# EAGLE library part 6130XX25721_61300625721 (library WR-PHD)
WR-PHD 2.54 mm Dual Socket Header Bottom Entry ARTICLE PROPERTIES: Pins:4;​ 6;​ 8;​ 10;​ 12;​ 16;​ 20;​ 24;​ 26;​ 32;​ 34 KIND PROPERTIES: Pitch：2.54 mm Quality Class:3 as per CECC 75 301-802 Rows：Dual Gender：Socket Header Type：Bottom Entry MATERIAL PROPERTIES: Insulator Material :PA46 Insulator Flammability Rating:UL94 V-0 Contact Material:Copper Alloy Contact Plating:Gold Contact Type:Stamped GENERAL INFORMATION Operating Temperature:-40 up to +125 °C Compliance:Lead free / RoHS ELECTRICAL PROPERTIES: Rated Current:3 A IR:3A Withstanding Voltage:500 V (AC) Contact Resistance:20 mΩ RISO:1000 MΩ CERTIFICATION UL Approval:E323964 PACKAGING PROPERTIES Packaging:Tube <https://katalog.we-online.com/media/images/v2/o33217v209%20Family_WR-PHD_6130xx25721.jpg> Details see: https://katalog.we-online.com/en/em/PHD_2_54_DUAL_SOCKET_HEADER_BOTTOM_ENTRY_6130XX25721 Updated by Yingchun,Shan 2019-10-22 2019 (C) Würth Elektronik
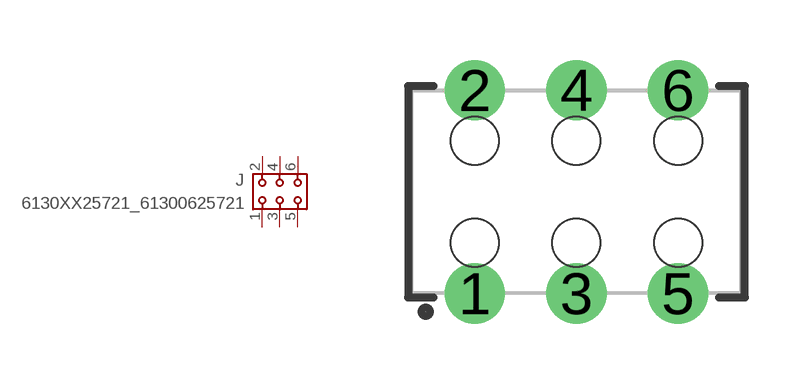
[diagram p184: symbol with the pads of 61300625721; footprint 61300625721]

Designator prefix J

## 6130XX25721_61300625721 (DATASHEET-URL: https://www.we-online.com/redexpert/spec/61300625721?ae; GENDER: Socket Header; IR: 3A; MOUNT: THT; PACKAGING: Tube; PART-NUMBER: 61300625721; PINS: 6; PITCH: 2.54 mm; ROWS: Dual; TYPE: Bottom Entry; VALUE: 61300625721)  [61300625721]
1  1  pas
2  2  pas
3  3  pas
4  4  pas
5  5  pas
6  6  pas

## Footprint 61300625721 (pad centres in mm)
WR-PHD 2.54 mm Dual Socket Header Bottom Entry,6 Pins
drill 1 pad 1.4: 1 -2.54,-2.54; 2 -2.54,2.54; 3 0,-2.54; 4 0,2.54; 5 2.54,-2.54; 6 2.54,2.54
hole 1.2 at -2.54,1.27
hole 1.2 at 0,1.27
hole 1.2 at 0,-1.27
hole 1.2 at -2.54,-1.27
hole 1.2 at 2.54,-1.27
hole 1.2 at 2.54,1.27